# Altium integrated library Grippy_Diddy_Proj.IntLib: 3 symbols
Pins are listed as number, name and electrical type; pins without a type are passive.

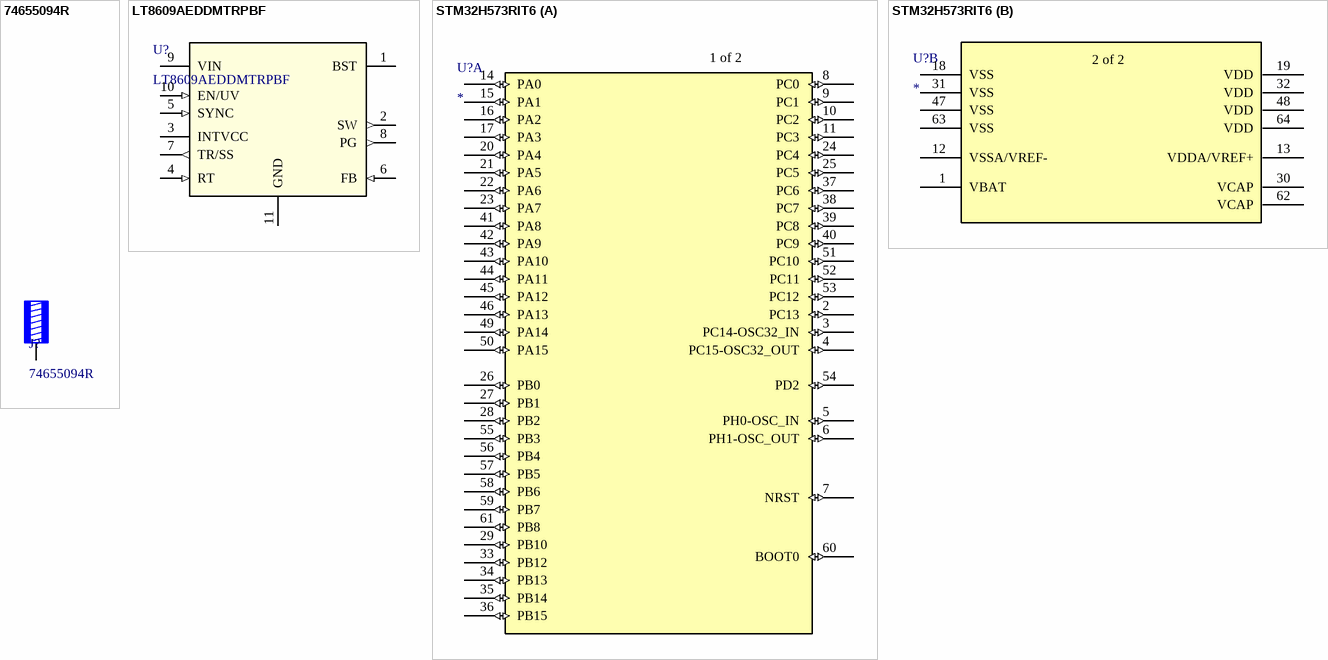
[diagram p0: symbols 74655094R to STM32H573RIT6]

## 74655094R
designator J?
WP-THRBU REDCUBE THR internal through-hole thread, M4 x 2.5mm, 50A; ComponentLink1Description: website; ComponentLink1URL: https://www.we-online.com/redexpert/article/74650074R?ad; ComponentLink2Description: datasheet; ComponentLink2URL: https://www.we-online.com/redexpert/spec/74650074R?ad
footprint 74655094R (REDCUBE THR with internal thread, M4x2.5mm, through)
pins: 1
text: /

## LT8609AEDDMTRPBF
designator U?
Buck Switching Regulator IC Positive Adjustable 0.782V 1 Output 3A 10-WFDFN Exposed Pad; ComponentLink1Description: Digikey; ComponentLink1URL: https://www.digikey.com/en/products/detail/analog-devices-inc/LT8609AEDDM-TRPBF/10668739; ComponentLink2Description: Datasheet; ComponentLink2URL: https://www.analog.com/media/en/technical-documentation/data-sheets/LT8609-8609A-8609B.pdf
footprint 10-WDFN
pins: 1 BST (power), 2 SW (out), 3 INTVCC (power), 4 RT (in), 5 SYNC (in), 6 FB (in), 7 TR/SS (out), 8 PG (out), 9 VIN (power), 10 EN/UV (in), 11 GND (power)

## STM32H573RIT6
designator U?
grippy MCU
footprint LQFP64 (10x10mm)
part A pins: 2 PC13 (io), 3 PC14-OSC32_IN (io), 4 PC15-OSC32_OUT (io), 5 PH0-OSC_IN (io), 6 PH1-OSC_OUT (io), 7 NRST (io), 8 PC0 (io), 9 PC1 (io), 10 PC2 (io), 11 PC3 (io), 14 PA0 (io), 15 PA1 (io), 16 PA2 (io), 17 PA3 (io), 20 PA4 (io), 21 PA5 (io), 22 PA6 (io), 23 PA7 (io), 24 PC4 (io), 25 PC5 (io), 26 PB0 (io), 27 PB1 (io), 28 PB2 (io), 29 PB10 (io), 33 PB12 (io), 34 PB13 (io), 35 PB14 (io), 36 PB15 (io), 37 PC6 (io), 38 PC7 (io), 39 PC8 (io), 40 PC9 (io), 41 PA8 (io), 42 PA9 (io), 43 PA10 (io), 44 PA11 (io), 45 PA12 (io), 46 PA13 (io), 49 PA14 (io), 50 PA15 (io), 51 PC10 (io), 52 PC11 (io), 53 PC12 (io), 54 PD2 (io), 55 PB3 (io), 56 PB4 (io), 57 PB5 (io), 58 PB6 (io), 59 PB7 (io), 60 BOOT0 (io), 61 PB8 (io)
part B pins: 1 VBAT (power), 12 VSSA/VREF- (power), 13 VDDA/VREF+ (power), 18 VSS (power), 19 VDD (power), 30 VCAP (power), 31 VSS (power), 32 VDD (power), 47 VSS (power), 48 VDD (power), 62 VCAP (power), 63 VSS (power), 64 VDD (power)
part A text: 1 of 2
part B text: 2 of 2